# Altium schematic symbol library DSC1001CI5-008.0000.SchLib: 1 symbol
Pins are listed as number, name and electrical type; pins without a type are passive.

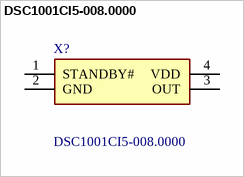
[diagram p0: symbol DSC1001CI5-008.0000]

## DSC1001CI5-008.0000
designator X?
MEMS OSCILLATOR, LOW POWER, -4; Manufacturer_Name: Microchip; Geometry.Height: 0.9mm; Manufacturer_Part_Number: DSC1001CI5-008.0000; Mouser Part Number: 579-001CI50080000; Mouser Price/Stock: https://www.mouser.co.uk/ProductDetail/Microchip-Technology/DSC1001CI5-008.0000?qs=1mbolxNpo8fUDrvmuRVITg%3D%3D; Arrow Part Number: DSC1001CI5-008.0000; Arrow Price/Stock: https://www.arrow.com/en/products/dsc1001ci5-008.0000/microchip-technology; Datasheet Link: https://www.arrow.com/en/products/dsc1001ci5-008.0000/microchip-technology
footprint DSC1001CI50080000
pins: 1 STANDBY#, 2 GND, 3 OUT, 4 VDD